# Altium footprint library CC0603KRX7R9BB473.PcbLib: 3 footprints
Each footprint in its own frame and in the unit in brackets; x right, y up, seen from the top. Pads: shape width x height; smd on the part's side, far side on the other; paste and mask are expansions set on the pad; w line width, h text height; cw(c..) or ccw(c..) is an arc to the next point about the centre after c.
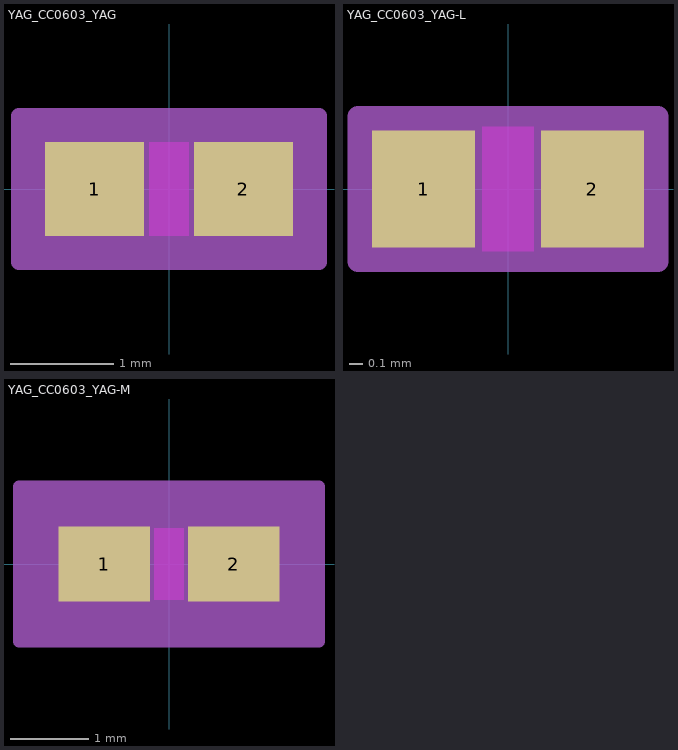
[diagram p0: the footprints below, top view; thin cyan lines are the x and y axes]

## YAG_CC0603_YAG [mil]
pads (2):
  rect 38x36 smd paste+0 mask+0: 1(-28.5,0) 2(28.5,0)
Top Layer keep-out:
  region: -7.5,-16 -7.5,16 7.5,16 7.5,-16
Keep-Out Layer:
  region: -7.5,-18 -7.5,18 7.5,18 7.5,-18
Mechanical 13:
  lines w1: -33.5,-18 -33.5,18 ; -33.5,-18 33.5,-18 ; -33.5,-18 -9.5,-18 -9.5,18 -33.5,18 ; -33.5,-18 -33.5,18 ; -33.5,18 33.5,18 ; 33.5,-18 33.5,18 ; 33.5,-18 33.5,18 ; 33.5,-18 9.5,-18 9.5,18 33.5,18
Mechanical 15:
  region: 57.5,-28 -57.5,-28 -57.5,28 57.5,28
  lines w6: -57.5,-28 57.5,-28 57.5,28 -57.5,28 -57.5,-28
3D body "YAG_CC0603_YAG.step": height 35.98, standoff 0, extent -33.5,-17.99 33.5,17.99

## YAG_CC0603_YAG-L [mil]
pads (2):
  rect 30x34 smd paste+0 mask+0: 1(-24.5,0) 2(24.5,0)
Top Layer keep-out:
  region: -7.5,-16 -7.5,16 7.5,16 7.5,-16
Top Overlay:
  text ".Designator" at -137.5,-25 h50
Keep-Out Layer:
  region: -7.5,-18 -7.5,18 7.5,18 7.5,-18
Mechanical 13:
  lines w1: -33.5,-18 -33.5,18 ; -33.5,-18 -9.5,-18 -9.5,18 -33.5,18 ; -33.5,-18 33.5,-18 ; -33.5,-18 -33.5,18 ; -33.5,18 33.5,18 ; 33.5,-18 9.5,-18 9.5,18 33.5,18 ; 33.5,-18 33.5,18 ; 33.5,-18 33.5,18
  text ".Designator" at -137.5,-25 h50
Mechanical 15:
  region: 43.5,-21 -43.5,-21 -43.5,21 43.5,21
  lines w6: -43.5,-21 -43.5,21 43.5,21 43.5,-21 -43.5,-21
3D body "YAG_CC0603_YAG.step": height 35.98, standoff 0, extent -33.5,-17.99 33.5,17.99

## YAG_CC0603_YAG-M [mil]
pads (2):
  rect 46x38 smd paste+0 mask+0: 1(-32.5,0) 2(32.5,0)
Top Layer keep-out:
  region: -7.5,-16 -7.5,16 7.5,16 7.5,-16
Top Overlay:
  text ".Designator" at -137.5,-25 h50
Keep-Out Layer:
  region: -7.5,-18 -7.5,18 7.5,18 7.5,-18
Mechanical 13:
  lines w1: -33.5,-18 -33.5,18 ; -33.5,-18 -9.5,-18 -9.5,18 -33.5,18 ; -33.5,-18 33.5,-18 ; -33.5,-18 -33.5,18 ; -33.5,18 33.5,18 ; 33.5,-18 9.5,-18 9.5,18 33.5,18 ; 33.5,-18 33.5,18 ; 33.5,-18 33.5,18
  text ".Designator" at -137.5,-25 h50
Mechanical 15:
  region: 75.5,-39 -75.5,-39 -75.5,39 75.5,39
  lines w6: -75.5,-39 -75.5,39 75.5,39 75.5,-39 -75.5,-39
3D body "YAG_CC0603_YAG.step": height 35.98, standoff 0, extent -33.5,-17.99 33.5,17.99